# Altium footprint library standard-case.PcbLib: 285 footprints (part 14 of 18)
Each footprint in its own frame and in the unit in brackets; x right, y up, seen from the top. Pads: shape width x height; smd on the part's side, far side on the other; paste and mask are expansions set on the pad; w line width, h text height; cw(c..) or ccw(c..) is an arc to the next point about the centre after c.
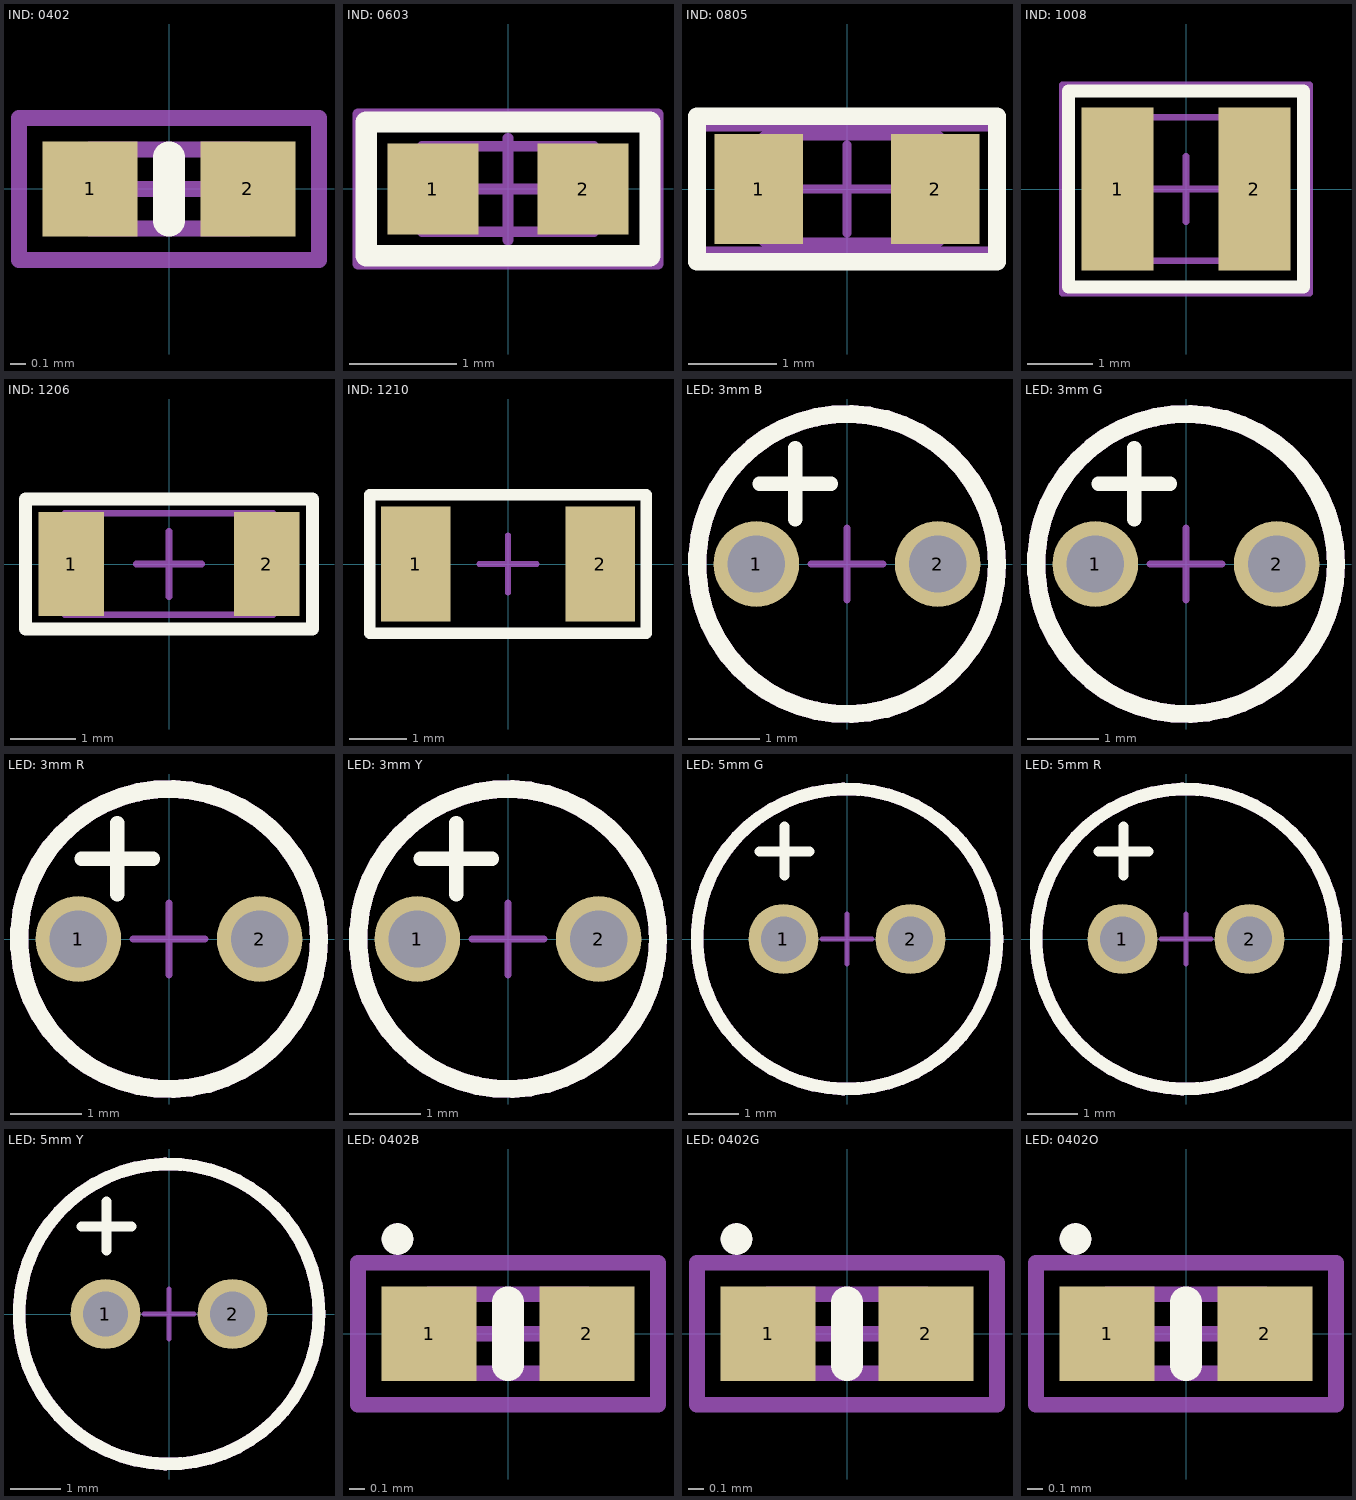
[diagram p13: the footprints below, top view; thin cyan lines are the x and y axes]

## IND: 0402 [mm]
height 0.5
pads (2):
  rect 0.6x0.6 smd: 1(-0.5,0) 2(0.5,0)
Top Overlay:
  lines w0.2: 0,-0.2 0,0.2
Mechanical 1:
  lines w0.1: -0.5,-0.25 -0.5,0.25 0.5,0.25 0.5,-0.25 -0.5,-0.25
Mechanical 15:
  lines w0.1: -0.25,0 0.25,0 ; 0,-0.25 0,0.25 ; -0.95,-0.45 -0.95,0.45 0.95,0.45 0.95,-0.45 -0.95,-0.45
3D body "Chip2PinSM127P600-8N.step": height 0.5, standoff 0, extent -0.5,-0.25 0.5,0.25

## IND: 0603 [mm]
height 0.8
pads (2):
  rect 0.85x0.85 smd: 1(-0.7,0) 2(0.7,0)
Top Overlay:
  lines w0.2: -1.325,-0.625 1.325,-0.625 1.325,0.625 -1.325,0.625 -1.325,-0.625
Mechanical 1:
  lines w0.1: -0.8,-0.4 0.8,-0.4 0.8,0.4 -0.8,0.4 -0.8,-0.4
Mechanical 15:
  lines w0.1: -0.475,0 0.475,0 ; 0,-0.475 0,0.475 ; -1.4,-0.7 -1.4,0.7 1.4,0.7 1.4,-0.7 -1.4,-0.7
3D body "Chip2PinSM127P600-8N.step": height 0.8, standoff 0, extent -0.8,-0.4 0.8,0.4

## IND: 0805 [mm]
height 1
pads (2):
  rect 1x1.25 smd: 1(-1,0) 2(1,0)
Top Overlay:
  lines w0.2: -1.7,-0.825 1.7,-0.825 1.7,0.825 -1.7,0.825 -1.7,-0.825
Mechanical 1:
  lines w0.1: -0.949,-0.6 1.05,-0.6 1.05,0.6 -0.949,0.6 -0.949,-0.6
Mechanical 15:
  lines w0.1: -0.5,0 0.5,0 ; 0,-0.5 0,0.5 ; -1.7,-0.7 -1.7,0.7 1.7,0.7 1.7,-0.7 -1.7,-0.7
3D body "User Library-FB_2012-1.STEP": height 0.85, standoff 0, extent -1,-0.625 1,0.625

## IND: 1008 [mm]
height 1
pads (2):
  rect 1.1x2.5 smd: 1(-1.05,0) 2(1.05,0)
Top Overlay:
  lines w0.2: -1.8,-1.5 1.8,-1.5 1.8,1.5 -1.8,1.5 -1.8,-1.5
Mechanical 1:
  lines w0.1: -1.4,-1.1 1.4,-1.1 1.4,1.1 -1.4,1.1 -1.4,-1.1
Mechanical 15:
  lines w0.1: -0.5,0 0.5,0 ; 0,-0.5 0,0.5 ; -1.9,-1.6 -1.9,1.6 1.9,1.6 1.9,-1.6 -1.9,-1.6
3D body "CW252016 Series Chip Inductor.stp": height 1.6, standoff 0, extent -1.25,-1 1.25,1

## IND: 1206 [mm]
height 0.6
pads (2):
  rect 1x1.6 smd: 1(-1.5,0) 2(1.5,0)
Top Overlay:
  lines w0.2: -2.2,-1 2.2,-1 2.2,1 -2.2,1 -2.2,-1
Mechanical 1:
  lines w0.1: -1.6,-0.775 1.6,-0.775 1.6,0.775 -1.6,0.775 -1.6,-0.775
Mechanical 15:
  lines w0.1: -0.5,0 0.5,0 ; 0,-0.5 0,0.5 ; -2.2,-1 -2.2,1 2.2,1 2.2,-1 -2.2,-1
3D body "Inductor_1206.STEP": height 1.8, standoff 0, extent -1.6,-0.8 1.6,0.8

## IND: 1210 [mm]
height 1
pads (2):
  rect 1.2x2 smd: 1(-1.6,0) 2(1.6,0)
Top Overlay:
  lines w0.2: -2.4,-1.2 2.4,-1.2 2.4,1.2 -2.4,1.2 -2.4,-1.2
Mechanical 1:
  lines w0.1: -2.4,-1.2 2.4,-1.2 2.4,1.2 -2.4,1.2 -2.4,-1.2
Mechanical 15:
  lines w0.1: -0.5,0 0.5,0 ; 0,-0.5 0,0.5 ; -2.4,-1.2 2.4,-1.2 2.4,1.2 -2.4,1.2 -2.4,-1.2
3D body "NLCV32-EF 1210_3225_metric.stp": height 2.2, standoff 0, extent -1.7,-1.25 1.7,1.25

## LED: 3mm B [mm]
height 0.6
pads (2):
  round 1.2 hole 0.8: 1(-1.27,0) 2(1.27,0)
Top Overlay:
  circle w0.254: c0,0 r2.1
  lines w0.2: -1.225,1.125 -0.225,1.125 ; -0.725,0.625 -0.725,1.625
Mechanical 1:
  circle w0.254: c0,0 r2.1
Mechanical 15:
  lines w0.1: -0.5,0 0.5,0 ; 0,-0.5 0,0.5
3D body "LED 3mm Blue 6mm Leads.step": height 8.89, standoff -2.49, extent -1.925,-1.924 1.57,1.924

## LED: 3mm G [mm]
height 0.6
pads (2):
  round 1.2 hole 0.8: 1(-1.27,0) 2(1.27,0)
Top Overlay:
  circle w0.254: c0,0 r2.1
  lines w0.2: -1.225,1.125 -0.225,1.125 ; -0.725,0.625 -0.725,1.625
Mechanical 1:
  circle w0.254: c0,0 r2.1
Mechanical 15:
  lines w0.1: -0.5,0 0.5,0 ; 0,-0.5 0,0.5
3D body "LED 3mm Green 6mm Leads.step": height 8.89, standoff -2.49, extent -1.925,-1.924 1.57,1.924

## LED: 3mm R [mm]
height 0.6
pads (2):
  round 1.2 hole 0.8: 1(-1.27,0) 2(1.27,0)
Top Overlay:
  circle w0.254: c0,0 r2.1
  lines w0.2: -1.225,1.125 -0.225,1.125 ; -0.725,0.625 -0.725,1.625
Mechanical 1:
  circle w0.254: c0,0 r2.1
Mechanical 15:
  lines w0.1: -0.5,0 0.5,0 ; 0,-0.5 0,0.5
3D body "LED 3mm Red 6mm Leads.step": height 8.89, standoff -2.49, extent -1.925,-1.924 1.57,1.924

## LED: 3mm Y [mm]
height 0.6
pads (2):
  round 1.2 hole 0.8: 1(-1.27,0) 2(1.27,0)
Top Overlay:
  circle w0.254: c0,0 r2.1
  lines w0.2: -1.225,1.125 -0.225,1.125 ; -0.725,0.625 -0.725,1.625
Mechanical 1:
  circle w0.254: c0,0 r2.1
Mechanical 15:
  lines w0.1: -0.5,0 0.5,0 ; 0,-0.5 0,0.5
3D body "LED 3mm Yellow 6mm Leads.step": height 8.89, standoff -2.49, extent -1.925,-1.924 1.57,1.924

## LED: 5mm G [mm]
height 0.6
pads (2):
  round 1.4 hole 0.9: 1(-1.27,0) 2(1.27,0)
Top Overlay:
  circle w0.254: c0,0 r3
  lines w0.2: -1.75,1.75 -0.75,1.75 ; -1.25,1.27 -1.25,2.25
Mechanical 1:
  circle w0.254: c0,0 r3
Mechanical 15:
  lines w0.1: -0.5,0 0.5,0 ; 0,-0.5 0,0.5
3D body "LED 5mm_GREEN.STEP": height 13.8, standoff -5, extent -3,-2.998 2.5,2.998

## LED: 5mm R [mm]
height 0.6
pads (2):
  round 1.4 hole 0.9: 1(-1.27,0) 2(1.27,0)
Top Overlay:
  circle w0.254: c0,0 r3
  lines w0.2: -1.75,1.75 -0.75,1.75 ; -1.25,1.27 -1.25,2.25
Mechanical 1:
  circle w0.254: c0,0 r3
Mechanical 15:
  lines w0.1: -0.5,0 0.5,0 ; 0,-0.5 0,0.5
3D body "LED 5mm_RED.STEP": height 13.8, standoff -5, extent -3,-2.998 2.5,2.998

## LED: 5mm Y [mm]
height 0.6
pads (2):
  round 1.4 hole 0.9: 1(-1.27,0) 2(1.27,0)
Top Overlay:
  circle w0.254: c0,0 r3
  lines w0.2: -1.75,1.75 -0.75,1.75 ; -1.25,1.27 -1.25,2.25
Mechanical 1:
  circle w0.254: c0,0 r3
Mechanical 15:
  lines w0.1: -0.5,0 0.5,0 ; 0,-0.5 0,0.5
3D body "LED 5mm_YELLOW.STEP": height 13.8, standoff -5, extent -3,-2.998 2.5,2.998

## LED: 0402B [mm]
height 0.35
pads (3):
  rect 0.6x0.6 smd: 1(-0.5,0) 2(0.5,0)
  round 0.2 on Mech1: ""(-0.7,0.6)
Top Overlay:
  circle w0.1: c-0.7,0.6 r0.05
  lines w0.2: 0,-0.2 0,0.2
Mechanical 1:
  lines w0.1: -0.5,-0.25 -0.5,0.25 0.5,0.25 0.5,-0.25 -0.5,-0.25
Mechanical 15:
  lines w0.1: -0.25,0 0.25,0 ; 0,-0.25 0,0.25 ; -0.95,-0.45 -0.95,0.45 0.95,0.45 0.95,-0.45 -0.95,-0.45
3D body "666.STEP": height 0.45, standoff 0, extent -0.505,-0.25 0.505,0.25

## LED: 0402G [mm]
height 0.35
pads (3):
  rect 0.6x0.6 smd: 1(-0.5,0) 2(0.5,0)
  round 0.2 on Mech1: ""(-0.7,0.6)
Top Overlay:
  circle w0.1: c-0.7,0.6 r0.05
  lines w0.2: 0,-0.2 0,0.2
Mechanical 1:
  lines w0.1: -0.5,-0.25 0.5,-0.25 0.5,0.25 -0.5,0.25 -0.5,-0.25
Mechanical 15:
  lines w0.1: -0.25,0 0.25,0 ; 0,-0.25 0,0.25 ; -0.95,-0.45 0.95,-0.45 0.95,0.45 -0.95,0.45 -0.95,-0.45
3D body "User Library-led_0402 green.STEP": height 0.45, standoff 0, extent -0.505,-0.25 0.505,0.25

## LED: 0402O [mm]
height 0.35
pads (3):
  rect 0.6x0.6 smd: 1(-0.5,0) 2(0.5,0)
  round 0.2 on Mech1: ""(-0.7,0.6)
Top Overlay:
  circle w0.1: c-0.7,0.6 r0.05
  lines w0.2: 0,-0.2 0,0.2
Mechanical 1:
  lines w0.1: -0.5,-0.25 0.5,-0.25 0.5,0.25 -0.5,0.25 -0.5,-0.25
Mechanical 15:
  lines w0.1: -0.25,0 0.25,0 ; 0,-0.25 0,0.25 ; -0.95,-0.45 0.95,-0.45 0.95,0.45 -0.95,0.45 -0.95,-0.45
3D body "8888.STEP": height 0.45, standoff 0, extent -0.505,-0.25 0.505,0.25